# EAGLE library part 6100XX21821_61002021821 (library WR-PHD)
WR-PHD 2.54mm SMT Socket Header ARTICLE PROPERTIES Pins: 4;​ 6;​ 8;​ 10;​ 12;​ 14;​ 16;​ 18;​ 20;​ 22;​ 24;​ 26;​ 28;​ 30;​ 32;​ 34;​ 36;​ 40 KIND PROPERTIES Pitch 2.54 mm Quality Class 3 as per CECC 75 301-802 Rows Dual Gender Socket Header Type Straight MATERIAL PROPERTIES Insulator Material PA9T Insulator Flammability Rating UL94 V-0 Contact Material Copper Alloy Contact Plating Gold Contact Type Stamped GENERAL INFORMATION Operating Temperature -40 up to +105 °C Compliance Lead free / RoHS ELECTRICAL PROPERTIES Rated Current 3 A;​ max. IR 1 3 A Withstanding Voltage 600 V (AC) Contact Resistance 20 mΩ RISO 1000 MΩ PACKAGING PROPERTIES Packaging Tube <https://katalog.we-online.com/media/images/v2/o33206v209%20Family_WR-PHD_610xxx21821.jpg> Details see: http://katalog.we-online.de/en/em/PHD_2_54_SMT_DUAL_SOCKET_HEADER_6100XX21821 Updated by Ella Wu 2019-06-12 2019 (C) Würth Elektronik
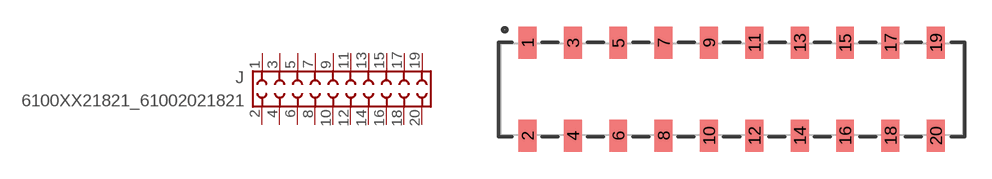
[diagram p232: symbol with the pads of 61002021821; footprint 61002021821]

Designator prefix J

## 6100XX21821_61002021821 (DATASHEET-URL: https://www.we-online.com/redexpert/spec/61002021821?ae; GENDER: Socket Header; IR: 3A; MOUNT: SMT; PACKAGING: Tube; PART-NUMBER: 61002021821; PINS: 20; PITCH: 2.54 mm; ROWS: Dual; TYPE: Straight; VALUE: 61002021821; WE-NUMBER: 61002021821)  [61002021821]
1  1  pas
2  2  pas
3  3  pas
4  4  pas
5  5  pas
6  6  pas
7  7  pas
8  8  pas
9  9  pas
10  10  pas
11  11  pas
12  12  pas
13  13  pas
14  14  pas
15  15  pas
16  16  pas
17  17  pas
18  18  pas
19  19  pas
20  20  pas

## Footprint 61002021821 (pad centres in mm)
WR-PHD 2.54mm Dual SMT Socket Header, 20 Pins
smd 1 x 1.8: 1 -11.43,2.6; 2 -11.43,-2.6; 3 -8.89,2.6; 4 -8.89,-2.6; 5 -6.35,2.6; 6 -6.35,-2.6; 7 -3.81,2.6; 8 -3.81,-2.6; 9 -1.27,2.6; 10 -1.27,-2.6; 11 1.27,2.6; 12 1.27,-2.6; 13 3.81,2.6; 14 3.81,-2.6; 15 6.35,2.6; 16 6.35,-2.6; 17 8.89,2.6; 18 8.89,-2.6; 19 11.43,2.6; 20 11.43,-2.6